# Altium footprint library Amin-Library.PcbLib: 601 footprints (part 23 of 38)
Each footprint in its own frame and in the unit in brackets; x right, y up, seen from the top. Pads: shape width x height; smd on the part's side, far side on the other; paste and mask are expansions set on the pad; w line width, h text height; cw(c..) or ccw(c..) is an arc to the next point about the centre after c.
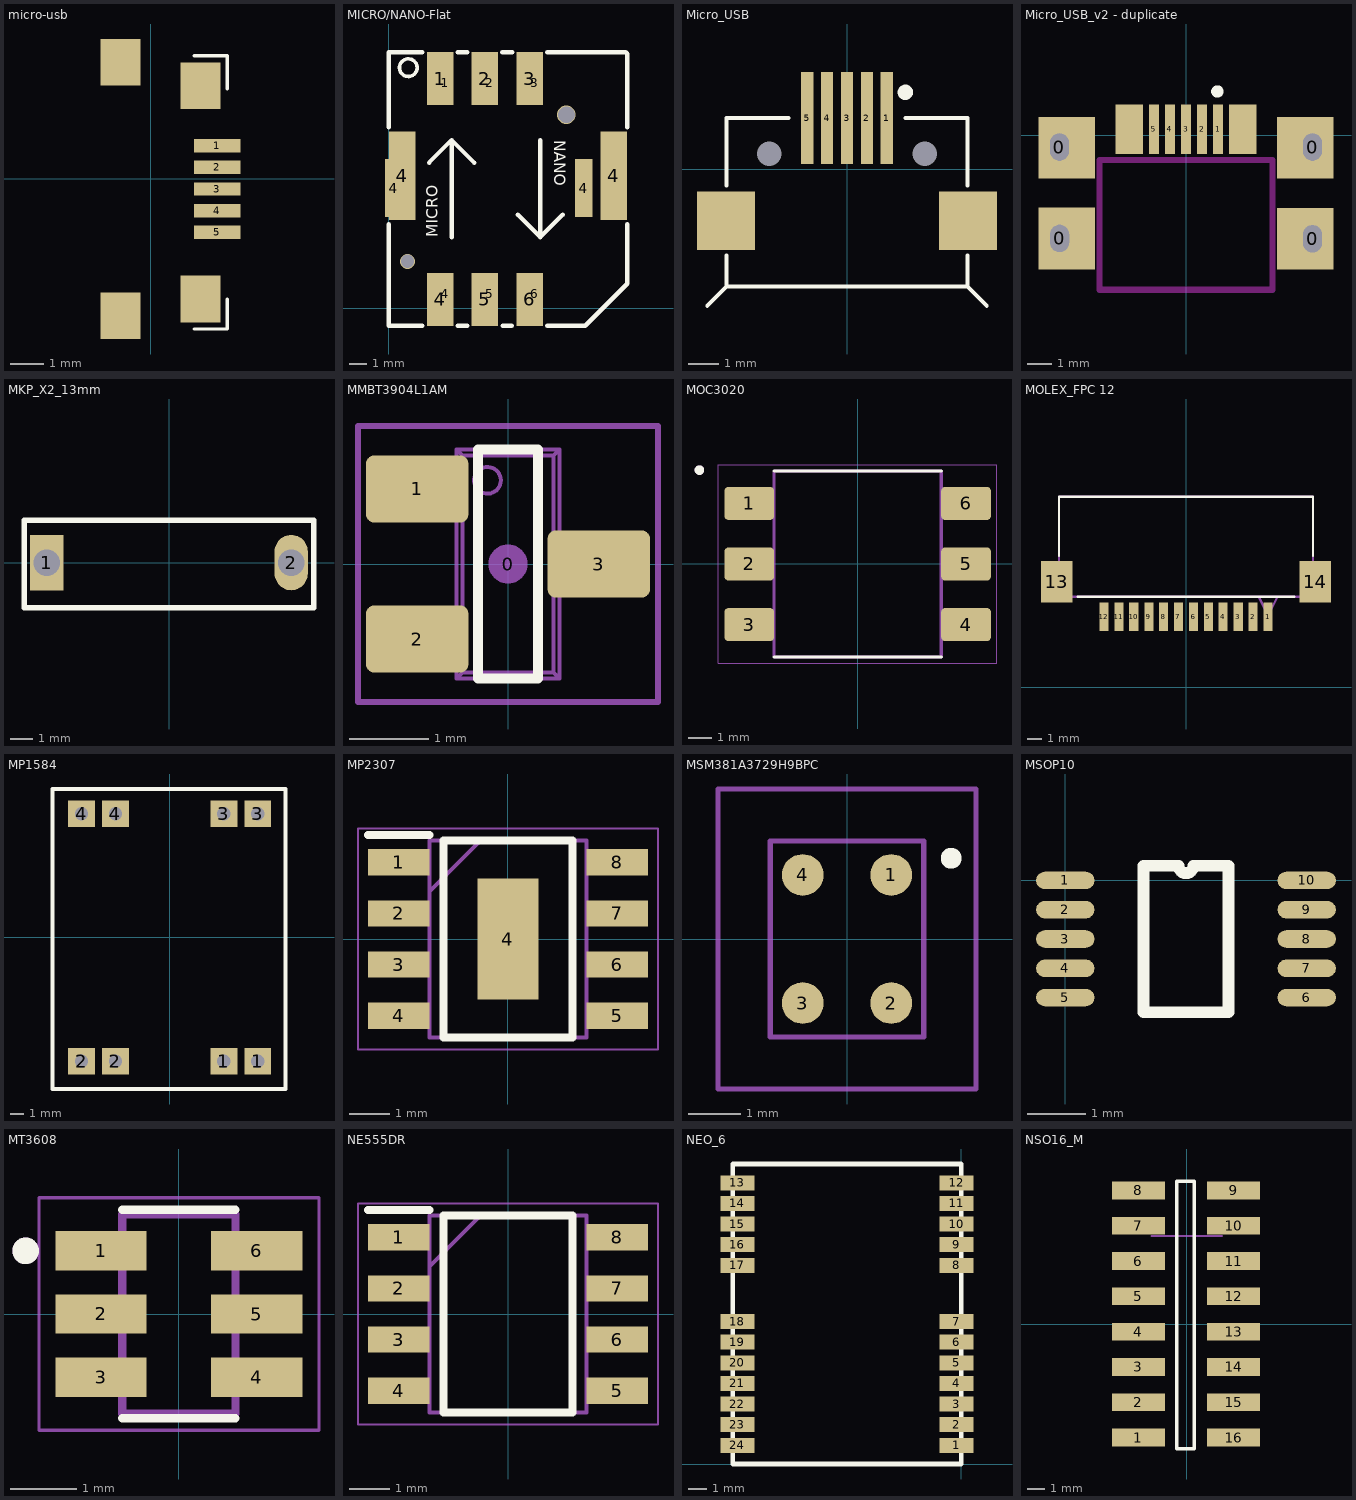
[diagram p22: the footprints below, top view; thin cyan lines are the x and y axes]

## micro-usb [mm]
pads (9):
  rect 1.4x0.4 smd: 1(1.994,0.995) 2(1.994,0.345) 3(1.994,-0.305) 4(1.994,-0.955) 5(1.994,-1.605)
  rect 1.2x1.4 smd: ""(-0.906,-4.105) ""(-0.906,3.495) ""(1.494,-3.605) ""(1.494,2.795)
Top Overlay:
  lines w0.1: 1.294,-4.505 2.294,-4.505 2.294,-3.605 ; 1.294,3.695 2.294,3.695 2.294,3.495 2.294,2.695 ; 2.294,-4.005 2.294,-3.905
3D body "usb_mc_2_b_smd.stp": height 2.69, standoff -0.59, extent -3.556,-4.265 2.044,3.735

## MICRO/NANO-Flat [mm]
pads (16):
  rect 1.5x3 smd: 1(2.9,13) 2(5.44,13) 3(7.98,13) 4(2.9,0.5) 5(5.44,0.5) 6(7.98,0.5)
  rect 0.9x1 smd: 1(3.18,12.775) 2(5.72,12.775) 3(8.26,12.775) 4(3.18,0.825) 5(5.72,0.825) 6(8.26,0.825)
  rect 1x3.29 smd: 4(0.28,6.805) 4(11.05,6.805)
  rect 1.5x5 smd: 4(0.75,7.5) 4(12.75,7.5)
via 10.06,10.955 diameter 1.05 hole 0.95
via 1.06,2.655 diameter 0.85 hole 0.75
Top Overlay:
  circle w0.2: c1.1,13.625 r0.5
  lines w0.254: 0,4.75 0,-1 1.9,-1 ; 0,10.25 0,14.5 1.9,14.5 ; 2.275,8.25 3.55,9.525 ; 3.55,4.025 3.55,9.525 ; 3.9,-1 4.45,-1 ; 3.9,14.5 4.45,14.5 ; 4.825,8.25 3.55,9.525 ; 6.425,14.5 7,14.5 ; 6.45,-1 6.975,-1 ; 7.3,5.3 8.575,4.025 ; 8.575,9.525 8.575,4.025 ; 8.975,-1 11.125,-1 13.5,1.375 13.5,4.75 ; 8.975,14.5 13.425,14.5 13.5,14.425 13.5,10.25 ; 9.85,5.3 8.575,4.025
  text "MICRO" at 3,4.025 h1.1
  text "NANO" at 9.15,9.525 h1.1
3D body "1042240820.stp": height 1.03, standoff -0.08, extent 1.6,0.55 11.95,13.1

## Micro_USB [mm]
height 4.32
pads (9):
  rect 0.4x3 smd: 1(1.3,1.679) 2(0.65,1.679) 3(0,1.679) 4(-0.65,1.679) 5(-1.3,1.679)
  round 0 hole 0.8 unplated: MH1(2.54,0.508) MH2(-2.54,0.508)
  rect 1.9x1.9 smd: ""(-3.95,-1.679) ""(3.95,-1.679)
Top Overlay:
  circle w0.25: c1.905,2.519 r0.125
  lines w0.127: -4.567,-4.459 -3.937,-3.829 -3.937,-2.813 ; -3.937,-0.527 -3.937,1.679 ; -3.9,-3.829 3.9,-3.829 ; -3.9,1.679 -1.905,1.679 ; 1.905,1.679 3.9,1.679 ; 3.937,-2.813 3.937,-3.829 4.567,-4.459 ; 3.937,-0.527 3.937,1.679

## Micro_USB_v2 - duplicate [mm]
height 1.05
pads (15):
  round 1.524 hole 0.762 slot 1.1 at 90 deg: 0(-5.125,-0.475) 0(-5.12,-4.175) 0(5.125,-4.191) 0(5.125,-0.475)
  rect 0.4x2 smd: 1(1.3,0.254) 2(0.65,0.254) 3(0,0.254) 4(-0.65,0.254) 5(-1.3,0.254)
  rect 2.3x2.5 smd: ""(-4.826,-4.175) ""(-4.826,-0.508) ""(4.826,-4.191) ""(4.826,-0.508)
  rect 1.1x2 smd: ""(-2.3,0.254) ""(2.3,0.254)
Top Overlay:
  circle w0.25: c1.272,1.778 r0.125
Keep-Out Layer:
  lines w0.254: -3.5,-6.25 -3.5,-1 ; -3.45,-6.25 3.5,-6.25 3.5,-1 ; -3.45,-1 3.45,-1
  lines w0.6: -5.125,-0.635 -5.125,-0.262 ; -5.12,-4.335 -5.12,-3.962 ; 5.125,-4.445 5.125,-3.962 ; 5.125,-0.762 5.125,-0.262

## MKP_X2_13mm [mm] "13mm"
pads (2):
  rect 1.5x2.5 hole 1.2: 1(-5.5,0)
  oval 1.5x2.5 hole 1.2: 2(5.5,0)
Top Overlay:
  lines w0.254: -6.516,-2.032 -6.516,1.905 ; -6.5,-2.032 6.5,-2.032 ; -6.5,1.905 6.5,1.905 ; 6.509,-2.032 6.509,1.905
3D body "User Library-X2.step": height 9, standoff -3, extent -6.627,-2 6.373,2

## MMBT3904L1AM [mm] "BJT TRANSISTOR SOT23, 3 pin"
height 1.003
pads (4):
  round 0.5 on Mech15: 0(0,0)
  rrect25% 1.3x0.85 smd: 1(-1.15,0.95) 2(-1.15,-0.95) 3(1.15,0)
Top Overlay:
  lines w0.127: -0.381,-1.45 -0.381,1.45 0.381,1.45 0.381,-1.45 -0.381,-1.45
  text "." at -2.125,0.95 h1.4
Mechanical 13:
  circle w0.05: c-0.26,1.06 r0.169
  lines w0.05: -1.19,-1.19 -1.19,-0.71 ; -1.19,0.71 -1.19,1.19 ; -1.099,-1.19 -1.099,-0.71 ; -1.099,0.71 -1.099,1.19 ; -1.074,-1.19 -1.074,-0.71 ; -1.074,0.71 -1.074,1.19 ; -0.825,-1.19 -0.825,-0.71 ; -0.825,0.71 -0.825,1.19 ; -0.65,-1.19 -1.4,-1.19 -1.4,-0.71 -0.65,-0.71 ; -0.65,0.71 -1.4,0.71 -1.4,1.19 -0.65,1.19 ; 0.65,-0.24 1.4,-0.24 1.4,0.24 0.65,0.24 ; 0.825,-0.24 0.825,0.24 ; 1.074,-0.24 1.074,0.24 ; 1.099,-0.24 1.099,0.24 ; 1.19,-0.24 1.19,0.24 ; -0.65,-1.45 0.65,-1.45 ; -0.65,-1.45 -0.65,1.45 ; -0.65,-1.45 -0.576,-1.376 ; -0.65,1.45 -0.576,1.376 ; -0.65,1.45 0.65,1.45 ; -0.576,-1.376 0.576,-1.376 ; -0.576,-1.376 -0.576,1.376 ; -0.576,1.376 0.576,1.376 ; 0.576,-1.376 0.65,-1.45 ; 0.576,-1.376 0.576,1.376 ; 0.576,1.376 0.65,1.45 ; 0.65,-1.45 0.65,1.45
Mechanical 15:
  lines w0.076: -1.9,-1.75 -1.9,1.75 1.9,1.75 1.9,-1.75 -1.9,-1.75
3D body "SOT23-3.STEP": height 1.29, standoff -0.01, extent -1.4,-1.45 1.4,1.45

## MOC3020 [mm]
pads (6):
  rrect25% 2.09x1.39 smd: 1(-4.54,2.54) 2(-4.54,0) 3(-4.54,-2.54) 4(4.54,-2.54) 5(4.54,0) 6(4.54,2.54)
Top Overlay:
  circle w0.2: c-6.63,3.93 r0.1
  lines w0.127: -3.5,-3.9 3.5,-3.9 ; -3.5,3.9 3.5,3.9
Mechanical 13:
  circle w0.2: c-6.63,3.93 r0.1
  lines w0.127: -3.5,-3.9 -3.5,3.9 3.5,3.9 3.5,-3.9 -3.5,-3.9
Mechanical 15:
  lines w0.05: -5.835,-4.15 -5.835,4.15 5.835,4.15 5.835,-4.15 -5.835,-4.15
3D body "IL4118-X009T.STEP": height 4.2, standoff -0.05, extent -4.773,-3.8 5.027,3.8

## MOLEX_FPC 12 [mil]
pads (14):
  rect 24x75 smd: 1(217,185) 2(177,185) 3(138,185) 4(98,185) 5(59,185) 6(20,185) 7(-20,185) 8(-59,185) 9(-98,185) 10(-138,185) 11(-177,185) 12(-217,185)
  rect 83x110 smd: 13(-341,278) 14(341,278)
Top Overlay:
  lines w6: -335,346 -335,502 335,502 335,346 ; -286,238 286,238
Mechanical 4:
  lines w6: -335,238 335,238 ; -335,238 -335,502 ; -335,238 335,238 ; -335,238 -335,502 ; -335,502 335,502 ; -335,502 335,502 ; 217,188 242,238 217,188 ; 217,188 192,238 217,188 ; 335,238 335,502 ; 335,238 335,502

## MP1584 [mm]
height 10.95
pads (8):
  rect 2x2 hole 1: 1(4.064,-9.271) 1(6.604,-9.271) 2(-6.604,-9.271) 2(-4.064,-9.271) 3(4.064,9.271) 3(6.604,9.271) 4(-6.604,9.271) 4(-4.064,9.271)
Top Overlay:
  lines w0.3: -8.788,-11.354 8.687,-11.354 8.687,11.125 -8.788,11.125 -8.788,-11.354
3D body "User Library-PCB_REG.STEP": height 6.26, standoff 2.59, extent -8.551,-11.1 8.449,10.9

## MP2307 [mm] "SOIC8"
pads (9):
  rect 1.525x0.65 smd: 1(-2.712,1.905) 2(-2.712,0.635) 3(-2.712,-0.635) 4(-2.712,-1.905) 5(2.712,-1.905) 6(2.712,-0.635) 7(2.712,0.635) 8(2.712,1.905)
  rect 1.525x3 smd paste-2: 4(0,0)
Top Overlay:
  lines w0.2: -3.475,2.58 -1.95,2.58 ; -1.6,-2.45 -1.6,2.45 1.6,2.45 1.6,-2.45 -1.6,-2.45
Top Paste:
  rectangle: -0.45,0.6 0.45,1.2
  rectangle: -0.45,-1.25 0.45,-0.65
  rectangle: -0.45,-0.3 0.45,0.3
Mechanical 13:
  lines w0.1: -1.95,1.18 -0.68,2.45 ; -1.95,-2.45 -1.95,2.45 1.95,2.45 1.95,-2.45 -1.95,-2.45
Mechanical 15:
  lines w0.05: -3.725,-2.75 -3.725,2.75 3.725,2.75 3.725,-2.75 -3.725,-2.75
3D body "FR9886SOGTR.stp": height 1.75, standoff 0, extent -3,-2.45 3,2.45

## MSM381A3729H9BPC [mm]
pads (4):
  round 0.8 smd: 1(0.85,1.23) 2(0.85,-1.23) 3(-0.85,-1.23) 4(-0.85,1.23)
Top Overlay:
  lines w0.3: 2,1.5 cw(c2,1.55) 2,1.6 cw(c2,1.55) 2,1.5
Mechanical 15:
  lines w0.1: -1.475,-1.88 1.475,-1.88 1.475,1.88 -1.475,1.88 -1.475,-1.88
Mechanical 20:
  lines w0.1: -2.475,-2.88 2.475,-2.88 2.475,2.88 -2.475,2.88 -2.475,-2.88
3D body "MSM381A3729H9BPC.stp": height 1.3, standoff 0, extent -1.475,-1.88 1.475,1.88

## MSOP10 [mm] "MSOP 10 pitch 0.5mm"
pads (10):
  oval 1x0.3 smd: 1(0,0) 2(0,-0.5) 3(0,-1) 4(0,-1.5) 5(0,-2) 6(4.125,-2) 7(4.125,-1.5) 8(4.125,-1) 9(4.125,-0.5) 10(4.125,0)
Top Overlay:
  lines w0.2: 1.335,-2.25 1.335,0.25 1.938,0.25 ccw(c2.063,0.25) 2.187,0.25 2.79,0.25 2.79,-2.25 1.335,-2.25

## MT3608 [mm]
pads (6):
  rect 1.37x0.59 smd: 1(-1.17,0.95) 2(-1.17,0) 3(-1.17,-0.95) 4(1.17,-0.95) 5(1.17,0) 6(1.17,0.95)
Top Overlay:
  circle w0.2: c-2.305,0.95 r0.1
  lines w0.127: -0.85,-1.565 0.85,-1.565 ; -0.85,1.565 0.85,1.565
Mechanical 4:
  circle w0.2: c-2.305,0.95 r0.1
  circle w0.2: c-2.305,0.95 r0.1
  lines w0.127: -0.85,-1.5 -0.85,1.5 ; -0.85,-1.5 0.85,-1.5 ; -0.85,-1.5 -0.85,1.5 ; -0.85,-1.5 0.85,-1.5 ; -0.85,1.5 0.85,1.5 ; -0.85,1.5 0.85,1.5 ; 0.85,-1.5 0.85,1.5 ; 0.85,-1.5 0.85,1.5
Mechanical 16:
  lines w0.05: -2.105,-1.75 -2.105,1.75 2.105,1.75 2.105,-1.75 -2.105,-1.75
3D body "MT3608--3DModel-STEP-56544.STEP": height 1.45, standoff 0, extent -1.4,-1.45 1.4,1.45

## NE555DR [mm]
pads (8):
  rect 1.525x0.65 smd: 1(-2.712,1.905) 2(-2.712,0.635) 3(-2.712,-0.635) 4(-2.712,-1.905) 5(2.712,-1.905) 6(2.712,-0.635) 7(2.712,0.635) 8(2.712,1.905)
Top Overlay:
  lines w0.2: -3.475,2.58 -1.95,2.58 ; -1.6,-2.45 -1.6,2.45 1.6,2.45 1.6,-2.45 -1.6,-2.45
Mechanical 13:
  lines w0.1: -1.95,1.18 -0.68,2.45 ; -1.95,-2.45 -1.95,2.45 1.95,2.45 1.95,-2.45 -1.95,-2.45
Mechanical 15:
  lines w0.05: -3.725,-2.75 -3.725,2.75 3.725,2.75 3.725,-2.75 -3.725,-2.75
3D body "NE555DR.stp": height 1.75, standoff 0, extent -3,-2.45 3,2.45

## NEO_6 [mm]
pads (24):
  rect 1.8x0.8 smd: 1(-0.254,1) 2(-0.254,2.1) 3(-0.254,3.2) 4(-0.254,4.3) 5(-0.254,5.4) 6(-0.254,6.5) 7(-0.254,7.6) 8(-0.254,10.6) 9(-0.254,11.7) 10(-0.254,12.8) 11(-0.254,13.9) 12(-0.254,15) 13(-11.938,15) 14(-11.938,13.9) 15(-11.938,12.8) 16(-11.938,11.7) 17(-11.938,10.6) 18(-11.938,7.6) 19(-11.938,6.5) 20(-11.938,5.4) 21(-11.938,4.3) 22(-11.938,3.2) 23(-11.938,2.1) 24(-11.938,1)
Top Overlay:
  lines w0.254: -12.192,0 -12.192,16.002 0,16.002 0,0 -12.192,0

## NSO16_M [mm] "SOIC, 16-Leads, Body 9.9x3.9mm, Pitch 1.27mm, IPC Low Density"
height 22
pads (16):
  rect 3x1 smd: 1(-2.75,-6.425) 2(-2.75,-4.425) 3(-2.75,-2.425) 4(-2.75,-0.425) 5(-2.75,1.575) 6(-2.75,3.575) 7(-2.75,5.575) 8(-2.75,7.575) 9(2.65,7.575) 10(2.65,5.575) 11(2.65,3.575) 12(2.65,1.575) 13(2.65,-0.425) 14(2.65,-2.425) 15(2.65,-4.425) 16(2.65,-6.425)
Top Overlay:
  lines w0.2: -0.575,-7.05 -0.575,8.1 0.425,8.1 0.425,-7.05 -0.575,-7.05
Mechanical 13:
  lines w0.1: -2,5 2,5